# Altium schematic symbol library CB3S.SchLib: 1 symbol
Pins are listed as number, name and electrical type; pins without a type are passive.

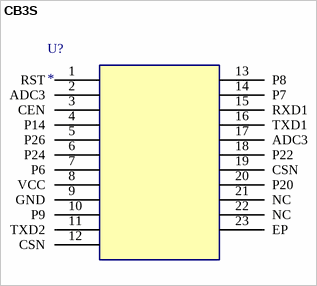
[diagram p0: symbol CB3S]

## CB3S
designator U?
Tuya CB3S(qh6) Wi-Fi + BLE module, BK7231N, 3.3V, UART1 on pins 15/16 (LCSC C2844245); MPN: CB3S(qh6); Manufacturer: TUYA; LCSC: C2844245
footprint WIFIM-SMD_TUYA_CB3S (CB3S footprint (LCSC))
pins: 1 RST, 2 ADC3, 3 CEN, 4 P14, 5 P26, 6 P24, 7 P6, 8 VCC (power), 9 GND (power), 10 P9, 11 TXD2, 12 CSN, 13 P8, 14 P7, 15 RXD1, 16 TXD1, 17 ADC3, 18 P22, 19 CSN, 20 P20, 21 NC, 22 NC, 23 EP (power)